# Altium footprint library FXL0420-XRX-M.PcbLib: 1 footprints
Each footprint in its own frame and in the unit in brackets; x right, y up, seen from the top. Pads: shape width x height; smd on the part's side, far side on the other; paste and mask are expansions set on the pad; w line width, h text height; cw(c..) or ccw(c..) is an arc to the next point about the centre after c.
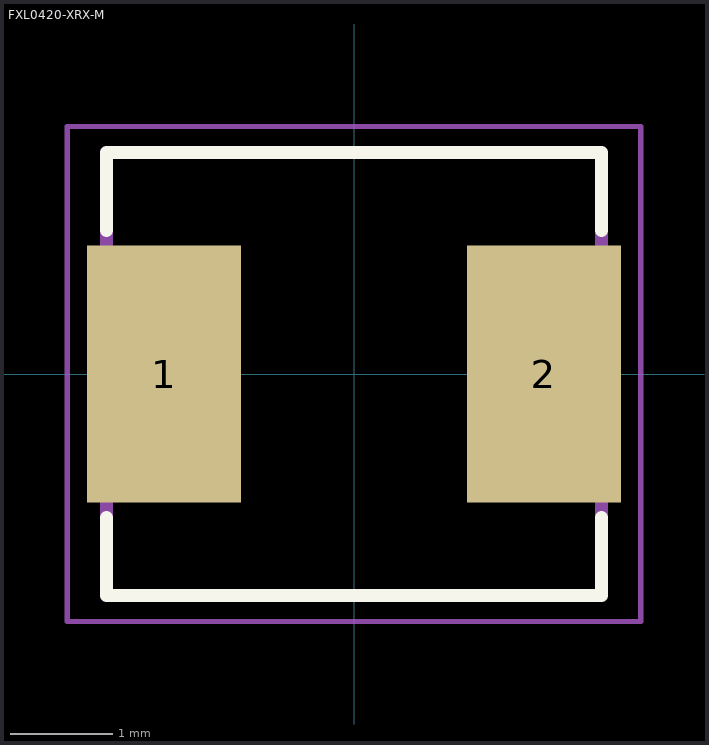
[diagram p0: the footprint, top view; thin cyan lines are the x and y axes]

## FXL0420-XRX-M [mm]
pads (2):
  rect 1.5x2.5 smd: 1(-1.85,0) 2(1.85,0)
Top Overlay:
  lines w0.127: -2.413,-1.397 -2.413,-2.159 2.413,-2.159 2.413,-1.397 ; -2.413,1.397 -2.413,2.159 2.413,2.159 2.413,1.397
Mechanical 13:
  lines w0.127: -2.413,-2.159 2.413,-2.159 2.413,2.159 -2.413,2.159 -2.413,-2.159
Mechanical 15:
  lines w0.05: -2.794,-2.413 -2.794,2.413 2.794,2.413 2.794,-2.413 -2.794,-2.413
3D body "FXL0420-4R7-M_3D.step": height 1.8, standoff 0, extent -2.425,-2.1 2.425,2.1